# Altium footprint library Propia.PcbLib: 378 footprints (part 22 of 24)
Each footprint in its own frame and in the unit in brackets; x right, y up, seen from the top. Pads: shape width x height; smd on the part's side, far side on the other; paste and mask are expansions set on the pad; w line width, h text height; cw(c..) or ccw(c..) is an arc to the next point about the centre after c.
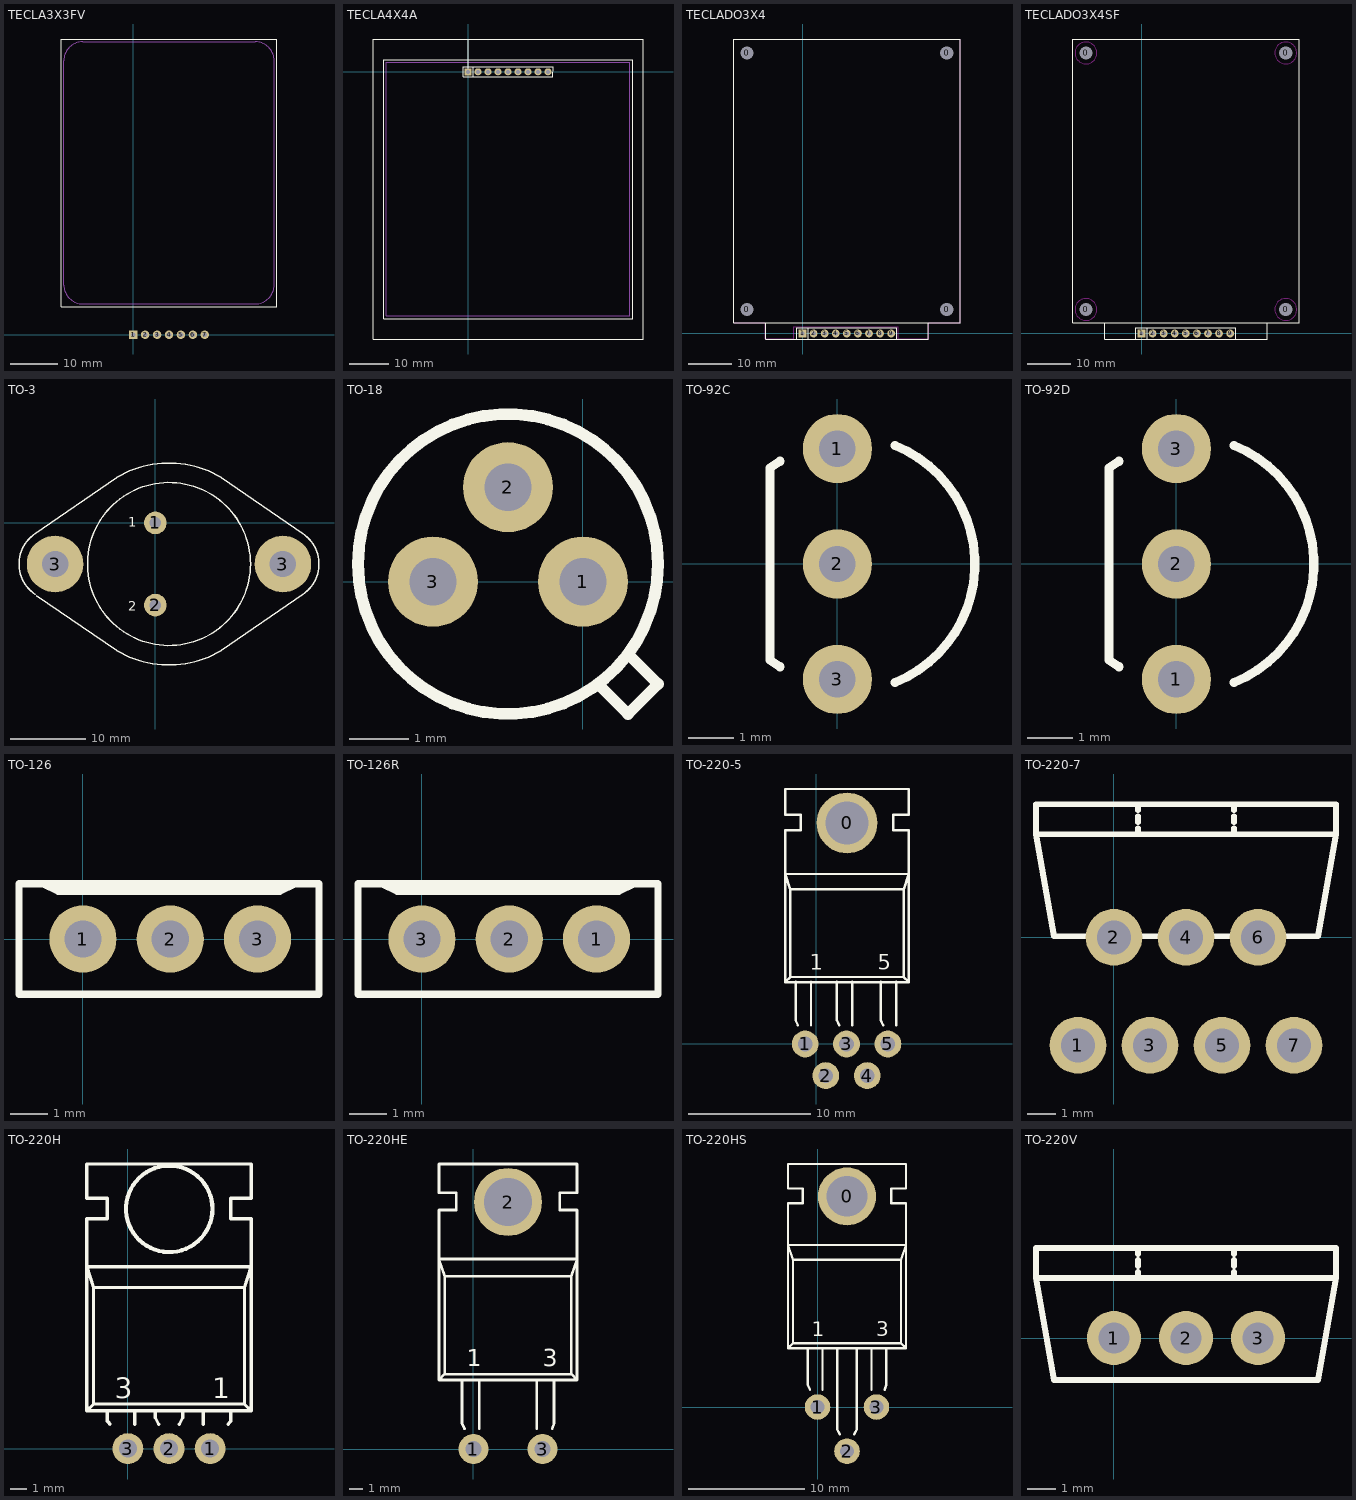
[diagram p21: the footprints below, top view; thin cyan lines are the x and y axes]

## TECLA3X3FV [mm]
pads (7):
  rect 1.8x1.8 hole 1: 1(0,0)
  round 1.8 hole 1: 2(2.54,0) 3(5.08,0) 4(7.62,0) 5(10.16,0) 6(12.7,0) 7(15.24,0)
TopOverlay:
  lines w0.25: -15.38,6 30.62,6 30.62,63 -15.38,63 -15.38,6
Mechanical1:
  lines w0.25: -14.78,10.6 ccw(c-10.78,10.6) -10.78,6.6 26.02,6.6 ccw(c26.02,10.6) 30.02,10.6 30.02,58.4 ccw(c26.02,58.4) 26.02,62.4 -10.78,62.4 ccw(c-10.78,58.4) -14.78,58.4 -14.78,10.6

## TECLA4X4A [mm]
pads (9):
  rect 1.8x1.8 hole 1: 1(0,0)
  round 1.8 hole 1: 2(2.54,0) 3(5.08,0) 4(7.62,0) 5(10.16,0) 6(12.7,0) 7(15.24,0) 8(17.78,0) 9(20.32,0)
TopOverlay:
  lines w0.254: 0,0 0,8.331 ; 1.27,-1.27 1.27,1.27 ; -24.13,-67.869 44.45,-67.869 44.45,8.331 -24.13,8.331 -24.13,-67.869 ; -21.463,-62.662 41.783,-62.662 41.783,3.124 -21.463,3.124 -21.463,-62.662 ; -1.27,-1.27 -1.27,1.27 21.59,1.27 21.59,-1.27 -1.27,-1.27
Mechanical1:
  lines w0.254: -20.713,-61.912 41.037,-61.912 41.037,2.368 -20.713,2.368 -20.713,-61.912

## TECLADO3X4 [mm]
pads (13):
  round 2.5 hole 3: 0(-12.74,5.5) 0(-12.74,64.3) 0(33.06,5.5) 0(33.06,64.3)
  rect 1.8x1.8 hole 1: 1(0,0)
  round 1.8 hole 1: 2(2.54,0) 3(5.08,0) 4(7.62,0) 5(10.16,0) 6(12.7,0) 7(15.24,0) 8(17.78,0) 9(20.32,0)
TopOverlay:
  lines w0.254: -8.47,2.47 -8.47,-1.27 -1.27,-1.27 ; 1.27,-1.27 1.27,1.27 ; 20.4,-1.27 28.87,-1.27 28.87,2.47 ; -1.27,-1.27 21.59,-1.27 21.59,1.27 -1.27,1.27 -1.27,-1.27 ; -15.8,2.5 36.2,2.5 36.2,67.5 -15.8,67.5 -15.8,2.5
KeepOutLayer:
  lines w0.254: -15.8,2.5 -8.5,2.5 -8.5,-1.2 -2,-1.2 -2,1.5 22,1.5 22,-1.2 28.9,-1.2 28.9,2.5 36.2,2.5 36.2,67.5 -15.8,67.5 -15.8,2.5

## TECLADO3X4SF [mm]
pads (13):
  round 2.5 hole 3: 0(-12.74,5.5) 0(-12.74,64.3) 0(33.06,5.5) 0(33.06,64.3)
  rect 1.8x1.8 hole 1: 1(0,0)
  round 1.8 hole 1: 2(2.54,0) 3(5.08,0) 4(7.62,0) 5(10.16,0) 6(12.7,0) 7(15.24,0) 8(17.78,0) 9(20.32,0)
TopOverlay:
  lines w0.254: -8.47,2.47 -8.47,-1.27 -1.27,-1.27 ; 1.27,-1.27 1.27,1.27 ; 20.4,-1.27 28.87,-1.27 28.87,2.47 ; -1.27,-1.27 21.59,-1.27 21.59,1.27 -1.27,1.27 -1.27,-1.27 ; -15.8,2.5 36.2,2.5 36.2,67.5 -15.8,67.5 -15.8,2.5
KeepOutLayer:
  circle w0.254: c-12.74,5.5 r2.5
  circle w0.254: c33.06,5.5 r2.5
  circle w0.254: c33.06,64.3 r2.5
  circle w0.254: c-12.74,64.3 r2.5

## TO-3 [mm]
pads (4):
  round 3 hole 1.5: 1(0,0) 2(0,-10.922)
  round 7.5 hole 3.5: 3(-13.297,-5.461) 3(16.929,-5.461)
TopOverlay:
  circle w0.2: c1.816,-5.461 r10.813
  lines w0.2: -15.964,-1.439 -5.169,5.969 ; -15.935,-9.497 cw(c-13.212,-5.461) -15.935,-1.425 ; -15.752,-9.694 -5.169,-16.891 ; -5.085,-16.946 ccw(c1.816,-5.461) 8.717,-16.946 ; -5.085,6.024 cw(c1.816,-5.461) 8.717,6.024 ; 8.801,-16.891 19.596,-9.483 ; 8.801,5.969 19.596,-1.439 ; 19.567,-9.497 ccw(c16.844,-5.461) 19.567,-1.425
  text "2" at -3.556,-11.684 h1.27
  text "1" at -3.556,-0.508 h1.27

## TO-18 [mil]
pads (3):
  round 60 hole 31.5: 1(0,0) 2(-50,62.99) 3(-100,0)
TopOverlay:
  circle w7.87: c-50,11.81 r100
  lines w7.87: 10,-68.19 30,-88.19 50,-68.19 30,-48.19

## TO-92C [mil]
pads (3):
  round 60 hole 31.5: 1(0,100) 2(0,0) 3(0,-100)
TopOverlay:
  lines w7.87: -49.71,-89.08 -58.33,-83.33 -58.33,83.33 -49.71,89.08 ; 49.85,-102.76 ccw(c8.33,0) 49.85,102.76

## TO-92D [mil]
pads (3):
  round 60 hole 31.5: 1(0,-100) 2(0,0) 3(0,100)
TopOverlay:
  lines w7.87: -49.71,-89.08 -58.33,-83.33 -58.33,83.33 -49.71,89.08 ; 49.85,-102.76 ccw(c8.33,0) 49.85,102.76

## TO-126 [mm]
pads (3):
  round 1.8 hole 1: 1(0,0) 2(2.34,0) 3(4.68,0)
TopOverlay:
  lines w0.2: -1.079,1.482 -0.656,1.282 5.27,1.282 5.694,1.482 ; -1.714,-1.482 -1.714,1.482 6.329,1.482 6.329,-1.482 -1.714,-1.482

## TO-126R [mm]
pads (3):
  round 1.8 hole 1: 1(4.68,0) 2(2.34,0) 3(0,0)
TopOverlay:
  lines w0.2: -1.079,1.482 -0.656,1.282 5.27,1.282 5.694,1.482 ; -1.714,-1.482 6.329,-1.482 6.329,1.482 -1.714,1.482 -1.714,-1.482

## TO-220-5 [mm]
pads (6):
  round 5 hole 3.5: 0(2.54,18.161)
  round 2.2 hole 1.2: 1(-0.9,0) 2(0.8,-2.6) 3(2.5,0) 4(4.2,-2.6) 5(5.9,0)
TopOverlay:
  lines w0.2: -1.687,5.119 -1.687,1.944 -1.495,1.539 ; -0.417,1.539 -0.417,5.119 ; 1.713,5.119 1.713,1.944 1.905,1.539 ; 2.983,1.539 2.983,5.119 ; 5.313,5.119 5.313,1.944 5.505,1.539 ; 6.583,1.539 6.583,5.119 ; -2.54,5.08 -2.117,5.503 ; -2.54,5.08 7.62,5.08 ; -2.54,5.08 -2.54,17.568 -1.27,17.568 -1.27,18.838 -2.54,18.838 -2.54,20.955 7.62,20.955 7.62,18.838 6.35,18.838 6.35,17.568 7.62,17.568 7.62,15.028 7.62,5.08 ; -2.117,5.503 7.197,5.503 ; -2.117,5.503 -2.117,12.7 ; -2.117,12.7 7.197,12.7 ; -2.117,12.7 -2.54,13.97 7.62,13.97 7.197,12.7 ; 7.197,5.503 7.197,12.7 ; 7.197,5.503 7.62,5.08
  text "1" at -0.508,6.096 h1.27
  text "5" at 5.08,6.096 h1.27

## TO-220-7 [mm]
pads (7):
  round 2 hole 1.2: 1(-1.27,-3.81) 2(0,0) 3(1.27,-3.81) 4(2.54,0) 5(3.81,-3.81) 6(5.08,0) 7(6.35,-3.81)
TopOverlay:
  lines w0.2: 0.847,3.632 0.847,3.843 ; 0.847,4.055 0.847,4.267 ; 0.847,4.478 0.847,4.69 ; 4.233,3.632 4.233,3.843 ; 4.233,4.055 4.233,4.267 ; 4.233,4.478 4.233,4.69 ; -2.752,3.632 -2.752,4.69 7.832,4.69 7.832,3.632 ; -2.752,3.632 -2.117,0.033 7.197,0.033 7.832,3.632 ; -2.752,3.632 7.832,3.632

## TO-220H [mm]
pads (3):
  round 1.905 hole 1.1: 1(5.08,0) 2(2.54,0) 3(0,0)
TopOverlay:
  circle w0.254: c2.557,14.796 r2.667
  lines w0.2: -1.27,1.693 -1.27,2.328 ; -1.222,1.661 -1.107,1.5 ; 0.423,1.5 0.423,2.328 ; 1.693,2.328 1.693,1.905 1.905,1.5 ; 3.175,1.5 3.387,1.905 3.387,2.328 ; 4.657,1.5 4.657,2.328 ; 6.195,1.5 6.358,1.717 ; 6.35,1.693 6.35,2.328 ; -2.54,2.328 -2.54,14.182 -1.27,14.182 -1.27,15.452 -2.54,15.452 -2.54,17.568 7.62,17.568 7.62,15.452 6.35,15.452 6.35,14.182 7.62,14.182 7.62,2.328 ; -2.54,2.328 7.62,2.328 ; -2.54,2.328 -2.117,2.752 ; -2.117,2.752 -2.117,9.948 ; -2.117,2.752 7.197,2.752 ; -2.117,9.948 -2.54,11.218 7.62,11.218 7.197,9.948 ; -2.117,9.948 7.197,9.948 ; 7.197,2.752 7.197,9.948 ; 7.197,2.752 7.62,2.328
  text "3" at -0.8,3.1 h1.27
  text "1" at 5.2,3.1 h1.27

## TO-220HE [mm]
pads (3):
  round 2.2 hole 1.2: 1(0,0) 3(5.08,0)
  round 5 hole 3.5: 2(2.54,18.161)
TopOverlay:
  lines w0.2: -0.847,5.08 -0.847,1.905 -0.655,1.5 ; 0.423,1.5 0.423,5.08 ; 4.657,1.5 4.657,5.08 ; 5.791,1.5 5.927,1.905 5.927,5.08 ; -2.54,5.08 -2.54,17.568 -1.27,17.568 -1.27,18.838 -2.54,18.838 -2.54,20.955 7.62,20.955 7.62,18.838 6.35,18.838 6.35,17.568 7.62,17.568 7.62,15.028 7.62,5.08 ; -2.54,5.08 7.62,5.08 ; -2.54,5.08 -2.117,5.503 ; -2.117,5.503 -2.117,12.7 ; -2.117,5.503 7.197,5.503 ; -2.117,12.7 -2.54,13.97 7.62,13.97 7.197,12.7 ; -2.117,12.7 7.197,12.7 ; 7.197,5.503 7.62,5.08 ; 7.197,5.503 7.197,12.7
  text "3" at 5.08,6.096 h1.27
  text "1" at -0.508,6.096 h1.27

## TO-220HS [mm]
pads (4):
  round 5 hole 3.5: 0(2.54,18.161)
  round 2.2 hole 1.2: 1(0,0) 2(2.54,-3.81) 3(5.08,0)
TopOverlay:
  lines w0.2: -0.847,5.08 -0.847,1.905 -0.655,1.5 ; 0.423,1.5 0.423,5.08 ; 1.693,5.08 1.693,-1.905 1.917,-2.34 ; 3.163,-2.344 3.387,-1.905 3.387,5.08 ; 4.657,1.5 4.657,5.08 ; 5.791,1.5 5.927,1.905 5.927,5.08 ; -2.54,5.08 -2.54,17.568 -1.27,17.568 -1.27,18.838 -2.54,18.838 -2.54,20.955 7.62,20.955 7.62,18.838 6.35,18.838 6.35,17.568 7.62,17.568 7.62,15.028 7.62,5.08 ; -2.54,5.08 7.62,5.08 ; -2.54,5.08 -2.117,5.503 ; -2.117,5.503 -2.117,12.7 ; -2.117,5.503 7.197,5.503 ; -2.117,12.7 -2.54,13.97 7.62,13.97 7.197,12.7 ; -2.117,12.7 7.197,12.7 ; 7.197,5.503 7.62,5.08 ; 7.197,5.503 7.197,12.7
  text "3" at 5.08,6.096 h1.27
  text "1" at -0.508,6.096 h1.27

## TO-220V [mm]
pads (3):
  round 1.905 hole 1.1: 1(0,0) 2(2.54,0) 3(5.08,0)
TopOverlay:
  lines w0.2: 0.847,2.117 0.847,2.328 ; 0.847,2.54 0.847,2.752 ; 0.847,2.963 0.847,3.175 ; 4.233,2.117 4.233,2.328 ; 4.233,2.54 4.233,2.752 ; 4.233,2.963 4.233,3.175 ; -2.752,2.117 -2.752,3.175 7.832,3.175 7.832,2.117 ; -2.752,2.117 -2.117,-1.482 7.197,-1.482 7.832,2.117 ; -2.752,2.117 7.832,2.117